# Altium schematic symbol library MIC2544-1YMM-TR.SchLib: 1 symbol
Pins are listed as number, name and electrical type; pins without a type are passive.

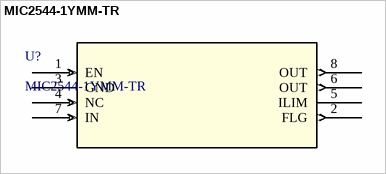
[diagram p0: symbol MIC2544-1YMM-TR]

## MIC2544-1YMM-TR
designator U?
No Description Available; Manufacturer_Name: Microchip; Copyright: Copyright (C) 2026 Ultra Librarian. All rights reserved.; Manufacturer_Part_Number: MIC2544-1YMM-TR; RefDes: RefDes; Type: Type
footprint MSOP-8_MM_MCH
pins: 1 EN (in), 2 FLG (out), 3 GND (power), 4 NC (in), 5 ILIM, 6 OUT (out), 7 IN (in), 8 OUT (out)